# Altium footprint library SF-1206SA500M-2.PcbLib: 1 footprints
Each footprint in its own frame and in the unit in brackets; x right, y up, seen from the top. Pads: shape width x height; smd on the part's side, far side on the other; paste and mask are expansions set on the pad; w line width, h text height; cw(c..) or ccw(c..) is an arc to the next point about the centre after c.
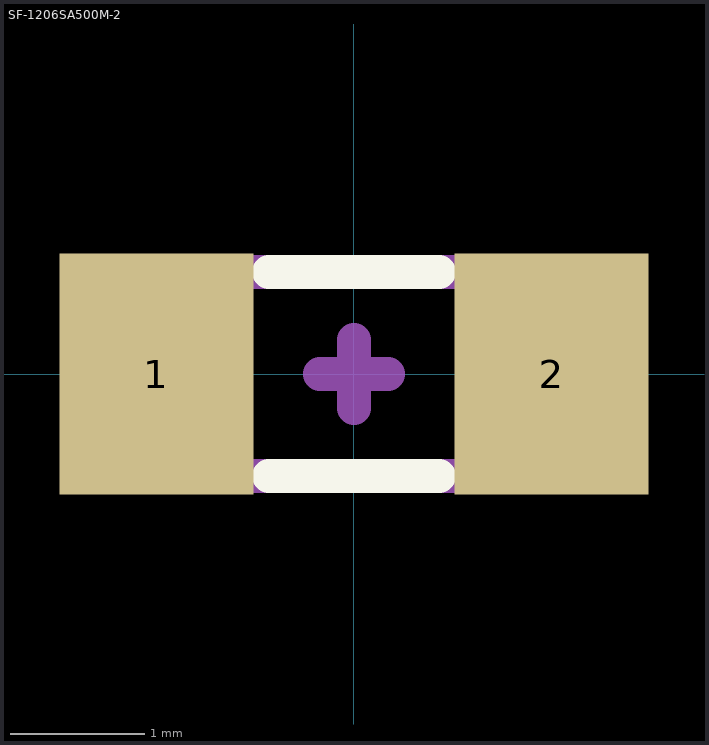
[diagram p0: the footprint, top view; thin cyan lines are the x and y axes]

## SF-1206SA500M-2 [mm]
pads (2):
  rect 1.45x1.8 smd mask+0.051: 1(-1.475,0) 2(1.475,0)
Top Overlay:
  lines w0.254: -0.635,-0.762 0.635,-0.762 ; -0.635,0.762 0.635,0.762
Mechanical 13:
  lines w0.254: -1.524,-0.762 1.524,-0.762 1.524,0.762 -1.524,0.762 -1.524,-0.762
Mechanical 15:
  lines w0.254: -0.254,0 0,0 ; 0,-0.254 0,0 ; 0,0.254 0,0 ; 0.254,0 0,0
3D body "SF-1206SA500M-2.STEP": height 0.55, standoff 0, extent -1.55,-0.8 1.55,0.8